# Altium schematic symbol library NTIR_Integrated_IC.SchLib: 17 symbols (part 1 of 2)
Pins are listed as number, name and electrical type; pins without a type are passive.

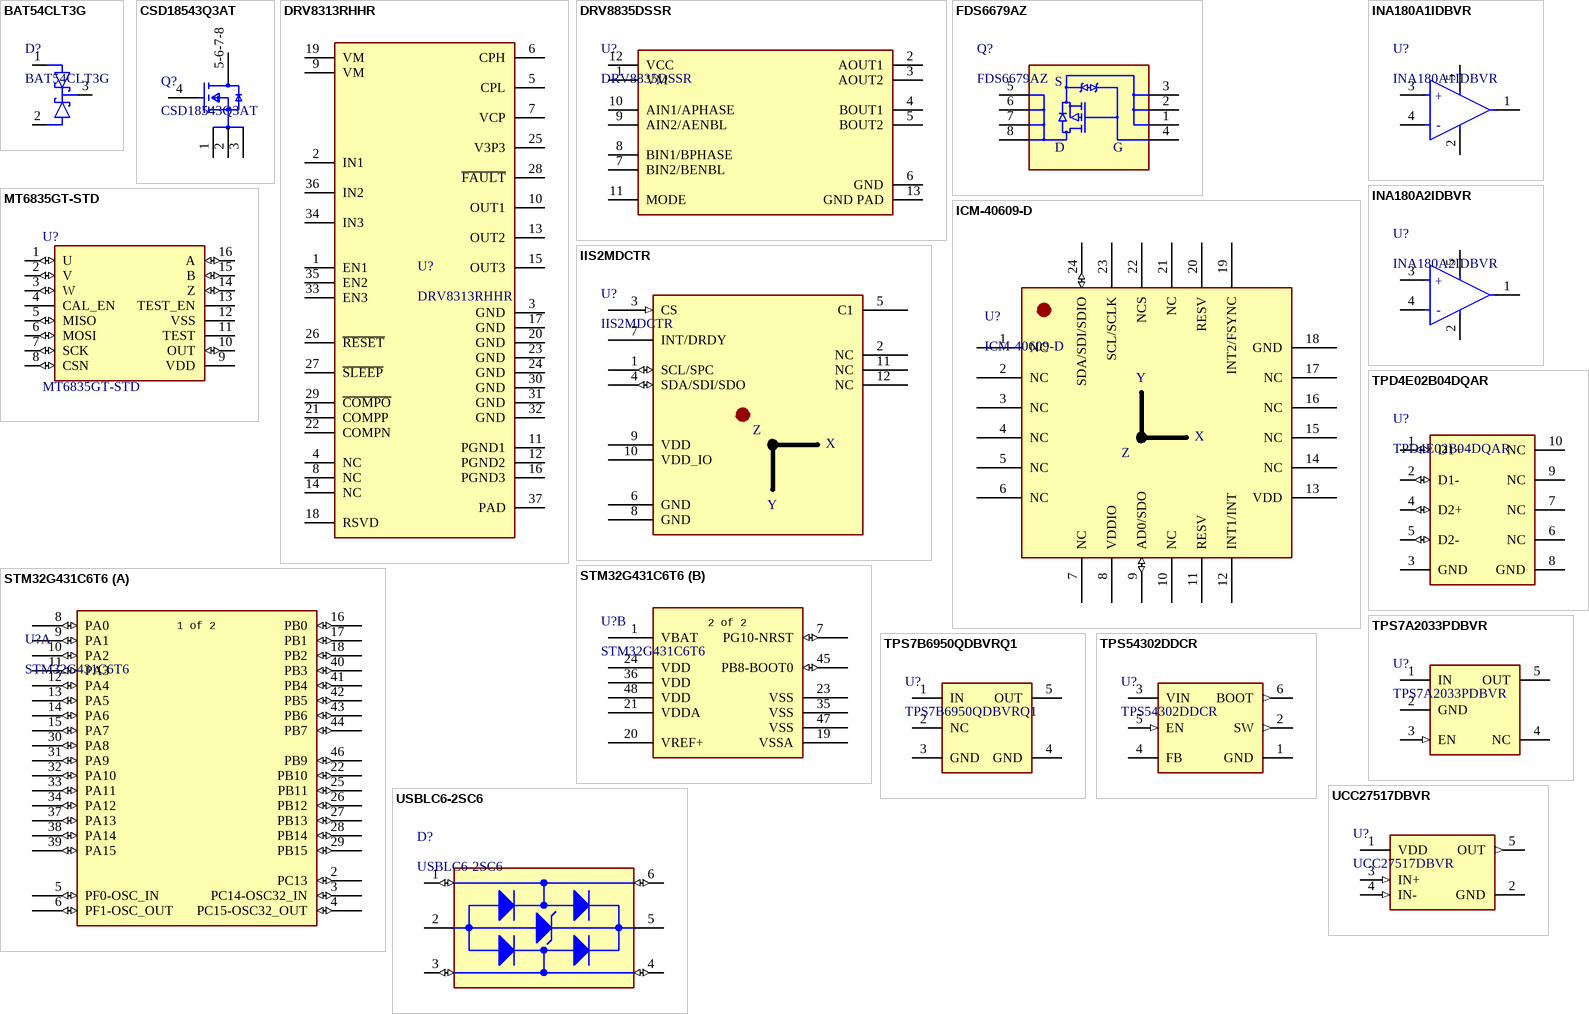
[diagram p0: symbols BAT54CLT3G to USBLC6-2SC6]

## BAT54CLT3G
designator D?
BAT54CL Series 30 V 2 uA Surface Mount Schottky Barrier Diode - SOT-23; Manufacturer: onsemi; Manufacturer Lifecycle Status: ACTIVE; Average Rectified Current: 200mA; Element Configuration: Common Cathode; Forward Voltage: 240mV; Max Forward Surge Current (Ifsm): 600mA; Max Output Current: 100mA; Max Power Dissipation: 225mW; Max Repetitive Reverse Voltage (Vrrm): 30V; Max Reverse Leakage Current: 2µA; Number of Elements: 2; Recovery Time: 5ns; Supplier 1: DigiKey; Manufacturer Part Number: BAT54CLT3G; RoHS: Compliant; Category: Schottky Diodes; Stock 1: 167313; Pricing 1: 1=0.13, 10=0.081, 100=0.0499, 500=0.036, 1000=0.03147, 2000=0.02764, 5000=0.02347 (USD); Case/Package: SOT-23-3; China RoHS: Compliant; Contact Plating: Tin; Forward Current: 200mA; Halogen Free: Halogen Free; Height: 1.01mm; Lead Free: Lead Free; Length: 3.04mm; Lifecycle Status: Production; Max Operating Temperature: 125°C; Max Reverse Voltage (DC): 30V; Max Surge Current: 600mA; Min Operating Temperature: -55°C; Number of Pins: 3; Number of Terminals: 3; Packaging: Tape and Reel; Peak Non-Repetitive Surge Current: 600mA; Radiation Hardening: No; REACH SVHC: Yes; Reverse Recovery Time: 5ns; Schedule B: 8541100070, 8541100070|8541100070|8541100070|8541100070|8541100070; Width: 1.4mm; ComponentLink1URL: https://datasheet.octopart.com:443/BAT54CLT3G-onsemi-datasheet-175423440.pdf?src-supplier=IHS; ComponentLink1Description: https://datasheet.octopart.com:443/BAT54CLT3G-onsemi-datasheet-175423440.pdf?src-supplier=IHS; ComponentLink2URL: https://datasheet.octopart.com:443/BAT54CLT3G-ON-Semiconductor-datasheet-78758876.pdf?src-supplier=JRH+Electronics; ComponentLink2Description: https://datasheet.octopart.com:443/BAT54CLT3G-ON-Semiconductor-datasheet-78758876.pdf?src-supplier=JRH+Electronics; ComponentLink3URL: https://datasheet.octopart.com:443/BAT54CLT3G-ON-Semiconductor-datasheet-141916634.pdf?src-supplier=Upverter; ComponentLink3Description: https://datasheet.octopart.com:443/BAT54CLT3G-ON-Semiconductor-datasheet-141916634.pdf?src-supplier=Upverter; ComponentLink4URL: https://datasheet.octopart.com:443/BAT54CLT3G-ON-Semiconductor-datasheet-8332005.pdf?src-supplier=Future+Electronics; ComponentLink4Description: https://datasheet.octopart.com:443/BAT54CLT3G-ON-Semiconductor-datasheet-8332005.pdf?src-supplier=Future+Electronics; ComponentLink5URL: https://datasheet.octopart.com:443/BAT54CLT3G-ON-Semiconductor-datasheet-8106935.pdf?src-supplier=Future+Electronics; ComponentLink5Description: https://datasheet.octopart.com:443/BAT54CLT3G-ON-Semiconductor-datasheet-8106935.pdf?src-supplier=Future+Electronics; ComponentLink6URL: https://datasheet.octopart.com:443/BAT54CLT3G-ON-Semiconductor-datasheet-41525499.pdf?src-supplier=RS+(Formerly+Allied+Electronics); ComponentLink6Description: https://datasheet.octopart.com:443/BAT54CLT3G-ON-Semiconductor-datasheet-41525499.pdf?src-supplier=RS+(Formerly+Allied+Electronics); ComponentLink7URL: https://datasheet.octopart.com:443/BAT54CLT3G-onsemi-datasheet-189128037.pdf?src-supplier=Master+Electronics; ComponentLink7Description: https://datasheet.octopart.com:443/BAT54CLT3G-onsemi-datasheet-189128037.pdf?src-supplier=Master+Electronics; ComponentLink8URL: https://datasheet.octopart.com:443/BAT54CLT3G-ON-Semiconductor-datasheet-11629545.pdf?src-supplier=Arrow+Electronics; ComponentLink8Description: https://datasheet.octopart.com:443/BAT54CLT3G-ON-Semiconductor-datasheet-11629545.pdf?src-supplier=Arrow+Electronics; ComponentLink9URL: http://sigma.octopart.com:80/15540786/rohs_certificate/ON-Semiconductor-BAT54CLT3G.pdf?src-supplier=Compliance+Statements; ComponentLink9Description: http://sigma.octopart.com:80/15540786/rohs_certificate/ON-Semiconductor-BAT54CLT3G.pdf?src-supplier=Compliance+Statements; ComponentLink10URL: http://sigma.octopart.com:80/15674214/materials_sheet/ON-Semiconductor-BAT54CLT3G.csv?src-supplier=Compliance+Statements; ComponentLink10Description: http://sigma.octopart.com:80/15674214/materials_sheet/ON-Semiconductor-BAT54CLT3G.csv?src-supplier=Compliance+Statements; ComponentLink11URL: http://sigma.octopart.com:80/150604010/rohs_statement/ON-Semiconductor-BAT54CLT3G.pdf?src-supplier=Compliance+Statements; ComponentLink11Description: http://sigma.octopart.com:80/150604010/rohs_statement/ON-Semiconductor-BAT54CLT3G.pdf?src-supplier=Compliance+Statements; ComponentLink12URL: http://sigma.octopart.com:80/reach_statement/ON-Semiconductor-company-79.pdf?src-supplier=Compliance+Statements; ComponentLink12Description: http://sigma.octopart.com:80/reach_statement/ON-Semiconductor-company-79.pdf?src-supplier=Compliance+Statements; ComponentLink13URL: https://octopart.com:443/opatz8j6/c1?t=fWwoKikT5261mXGM0ypy0g0IGQzQcDddsSZuvbSVdmB-1nZSRZ4ggwUKqIc0QYATxiN1QNv3tc5K9gNLWSsypfRmlmmLl0CvTb6IWTPcR-jy4ZtU7iJlv7LHrjajWQE2jihf16JKVcuOV1nA2-N-excMr1_B4nLS4kXG99ZhUnnRORXzXCD22yMfTlIHVWxdWHuIGrDRLRfDN_FEl5iESrFYiOS-fWRa5LxuqDiveXSQWuYMoy0mSfHtN-TtcfG_yO7Nd7kaCwpBKZqOkFRn_ARKtZBKqK2rNXBFzcF_wkdg0CPJ3JBCCd0-fzEpMgisCGH-zXoAjZ7-YzxmcgmCGNIVYquym6vDa-BdygE&src-supplier=Compliance+Statements; ComponentLink13Description: https://octopart.com:443/opatz8j6/c1?t=fWwoKikT5261mXGM0ypy0g0IGQzQcDddsSZuvbSVdmB-1nZSRZ4ggwUKqIc0QYATxiN1QNv3tc5K9gNLWSsypfRmlmmLl0CvTb6IWTPcR-jy4ZtU7iJlv7LHrjajWQE2jihf16JKVcuOV1nA2-N-excMr1_B4nLS4kXG99ZhUnnRORXzXCD22yMfTlIHVWxdWHuIGrDRLRfDN_FEl5iESrFYiOS-fWRa5LxuqDiveXSQWuYMoy0mSfHtN-TtcfG_yO7Nd7kaCwpBKZqOkFRn_ARKtZBKqK2rNXBFzcF_wkdg0CPJ3JBCCd0-fzEpMgisCGH-zXoAjZ7-YzxmcgmCGNIVYquym6vDa-BdygE&src-supplier=Compliance+Statements; ComponentLink14URL: https://octopart.com:443/opatz8j6/c1?t=B_1W9NDPKiVW9_xeBhSjXW6qpRFQt1GubKuBeL6C7KMWiDqOWuxbkOIcp9dqtX3Yq8--5XW88lfGBVA7HmD66DFyQvDNcrrPjWXZiG4711EOeHHnHpPqwc95_S4fQme7yE9n3sYxdAQvxBXSm4yRVJ71c-OpzKpAJ6ywCVT0a0sKLuIcOVcaIgD61fZtF_LS1kcCDjRxNYrL9WJZcGi5NptJxef-JqYkGUKDfcFHMGi1KZqXCgPZbgxa-Fw5LZxpHp3-6aQwXylQzVvUqX6mobR1Vl3H8PpiMaQjr6OwzEQ9egeKJpLqUcsu08VRy-SY_uHfFQyy3GilZ_cbGYiHirfBU5Mi5EnID-Ym-OKf&src-supplier=Compliance+Statements; ComponentLink14Description: https://octopart.com:443/opatz8j6/c1?t=B_1W9NDPKiVW9_xeBhSjXW6qpRFQt1GubKuBeL6C7KMWiDqOWuxbkOIcp9dqtX3Yq8--5XW88lfGBVA7HmD66DFyQvDNcrrPjWXZiG4711EOeHHnHpPqwc95_S4fQme7yE9n3sYxdAQvxBXSm4yRVJ71c-OpzKpAJ6ywCVT0a0sKLuIcOVcaIgD61fZtF_LS1kcCDjRxNYrL9WJZcGi5NptJxef-JqYkGUKDfcFHMGi1KZqXCgPZbgxa-Fw5LZxpHp3-6aQwXylQzVvUqX6mobR1Vl3H8PpiMaQjr6OwzEQ9egeKJpLqUcsu08VRy-SY_uHfFQyy3GilZ_cbGYiHirfBU5Mi5EnID-Ym-OKf&src-supplier=Compliance+Statements; Supplier Part Number 1: BAT54CLT3GOSDKR-ND
footprint ONSC-SOT-23-3-318-08_V (SOT23, 3-Leads, Body 2.92x1.3mm, Pitch 0.95mm)
pins: 1 A1, 2 A2, 3 K

## CSD18543Q3AT
designator Q?
60-V, N channel NexFET™ power MOSFET, single SON 3 mm x 3 mm, 9.9 mOhm 8-VSONP -55 to 150; Manufacturer: Texas Instruments; Manufacturer Lifecycle Status: ACTIVE; Continuous Drain Current (ID): 12A; Drain to Source Breakdown Voltage: 60V; Drain to Source Resistance: 8.1mΩ; Gate to Source Voltage (Vgs): 20V; Max Junction Temperature (Tj): 150°C; Number of Channels: 1; Power Dissipation: 2.8W; Turn-Off Delay Time: 8ns; Turn-On Delay Time: 9ns; Supplier 1: DigiKey; Manufacturer Part Number: CSD18543Q3AT; RoHS: Compliant; Category: MOSFETs; Stock 1: 4526; Pricing 1: 1=2.29, 10=1.462, 100=0.9912 (USD); Drain to Source Voltage (Vdss): 60V; Element Configuration: Single; Height: 900µm; Length: 3.3mm; Lifecycle Status: Production; Max Operating Temperature: 150°C; Min Operating Temperature: -55°C; Number of Pins: 8; Schedule B: 8541290080, 8541290080|8541290080, 8541290080|8541290080|8541290080|8541290080|8541290080; Thickness: 800µm; Width: 3.3mm; ComponentLink1URL: https://sigma.octopart.com:443/184372195/technical_drawing/Texas-Instruments-CSD18543Q3AT.pdf?src-supplier=Texas+Instruments; ComponentLink1Description: https://sigma.octopart.com:443/184372195/technical_drawing/Texas-Instruments-CSD18543Q3AT.pdf?src-supplier=Texas+Instruments; ComponentLink2URL: https://octopart.com:443/opatz8j6/c1?t=SsZgKvRmmw05RbnxMb6edfQyltnbhyNkxL9f19K7YcDX2j1foEMjoZPIc1l6vPtWCior1K7MK4Ecl1cKgo7MV1fVyam4EaqiB1Wt0OcocW5rsSx2yHOKWqXc7qV_A0CR85SjtUmhgxtnEX_hM021VMdHmrWiCD7BUQ-eFjN1wT7d3uOjDZQ6HjTgQKaKXek5tndBDP7-u4o-8p4DuqFUS4zP_5tfnTJWQnkrrbk4pzubypwZn_kVBqW1ULvAfegc6D8FFE5u7LfzGe8qoWlBn9GcTR49XIZj8i8BnCmCBkJ1P3eljVqSMcggCW9mefLwr27y7eoW1Wo15o2SxNy6lW0bRjf9UomrOlGTID-rE5uK6cy_FeSS_Sykc-I3kUdFVxsB4BxBI3g&src-supplier=Texas+Instruments; ComponentLink2Description: https://octopart.com:443/opatz8j6/c1?t=SsZgKvRmmw05RbnxMb6edfQyltnbhyNkxL9f19K7YcDX2j1foEMjoZPIc1l6vPtWCior1K7MK4Ecl1cKgo7MV1fVyam4EaqiB1Wt0OcocW5rsSx2yHOKWqXc7qV_A0CR85SjtUmhgxtnEX_hM021VMdHmrWiCD7BUQ-eFjN1wT7d3uOjDZQ6HjTgQKaKXek5tndBDP7-u4o-8p4DuqFUS4zP_5tfnTJWQnkrrbk4pzubypwZn_kVBqW1ULvAfegc6D8FFE5u7LfzGe8qoWlBn9GcTR49XIZj8i8BnCmCBkJ1P3eljVqSMcggCW9mefLwr27y7eoW1Wo15o2SxNy6lW0bRjf9UomrOlGTID-rE5uK6cy_FeSS_Sykc-I3kUdFVxsB4BxBI3g&src-supplier=Texas+Instruments; ComponentLink3URL: https://sigma.octopart.com:443/181443430/technical_drawing/Texas-Instruments-CSD18543Q3AT.pdf?src-supplier=Texas+Instruments; ComponentLink3Description: https://sigma.octopart.com:443/181443430/technical_drawing/Texas-Instruments-CSD18543Q3AT.pdf?src-supplier=Texas+Instruments; ComponentLink4URL: https://datasheet.octopart.com:443/CSD18543Q3AT-Texas-Instruments-datasheet-73765672.pdf?src-supplier=Upverter; ComponentLink4Description: https://datasheet.octopart.com:443/CSD18543Q3AT-Texas-Instruments-datasheet-73765672.pdf?src-supplier=Upverter; ComponentLink5URL: https://datasheet.octopart.com:443/CSD18543Q3AT-Texas-Instruments-datasheet-160724818.pdf?src-supplier=Augswan; ComponentLink5Description: https://datasheet.octopart.com:443/CSD18543Q3AT-Texas-Instruments-datasheet-160724818.pdf?src-supplier=Augswan; ComponentLink6URL: http://sigma.octopart.com:80/reach_statement/Texas-Instruments-company-64.pdf?src-supplier=Compliance+Statements; ComponentLink6Description: http://sigma.octopart.com:80/reach_statement/Texas-Instruments-company-64.pdf?src-supplier=Compliance+Statements; ComponentLink7URL: http://sigma.octopart.com:80/conflict_mineral_statement/Texas-Instruments-company-63.pdf?src-supplier=Compliance+Statements; ComponentLink7Description: http://sigma.octopart.com:80/conflict_mineral_statement/Texas-Instruments-company-63.pdf?src-supplier=Compliance+Statements; Supplier Part Number 1: 296-45302-1-ND
footprint FP-DNH0008A-MFG
pins: 1 S, 2 S, 3 S, 4 G, 5-6-7-8 D

## DRV8313RHHR
designator U?
65-V max 3-A peak 3-phase motor driver with integrated FETs 36-VQFN -40 to 125; Manufacturer_Name: Texas Instruments; TYPE: TYPE; RefDes: RefDes; Copyright: Copyright (C) 2026 Ultra Librarian. All rights reserved.; Manufacturer_Part_Number: DRV8313RHHR
footprint QFN50P600X600X90-37N
pins: 1 EN1, 2 IN1, 3 GND, 4 NC, 5 CPL, 6 CPH, 7 VCP, 8 NC, 9 VM, 10 OUT1, 11 PGND1, 12 PGND2, 13 OUT2, 14 NC, 15 OUT3, 16 PGND3, 17 GND, 18 RSVD, 19 VM, 20 GND, 21 COMPP, 22 COMPN, 23 GND, 24 GND, 25 V3P3, 26 ~{RESET}, 27 ~{SLEEP}, 28 ~{FAULT}, 29 ~{COMPO}, 30 GND, 31 GND, 32 GND, 33 EN3, 34 IN3, 35 EN2, 36 IN2, 37 PAD

## DRV8835DSSR
designator U?
12-V, 1.5-A dual H-bridge motor driver 12-WSON -40 to 85; Manufacturer: Texas Instruments; Manufacturer Lifecycle Status: ACTIVE; Collector Emitter Voltage (VCEO): 11V; Drain to Source Resistance: 305mΩ; Interface: Parallel; Logic Function: AND; Max Collector Current: 1.5A; Max Junction Temperature (Tj): 150°C; Max Supply Voltage: 7V; Min Supply Voltage: 2V; Motor Type: Brushed; Nominal Supply Current: 450µA; Number of Outputs: 2; Switching Frequency: 250kHz; Supplier 1: DigiKey; Manufacturer Part Number: DRV8835DSSR; RoHS: Compliant; Category: Motor Drivers; Stock 1: 49571; Pricing 1: 1=2.19, 10=1.619, 25=1.476, 100=1.3189, 250=1.24396, 500=1.20412 (USD); Height: 800µm; Lead Free: Lead Free; Length: 2mm; Lifecycle Status: Production; Max Operating Temperature: 85°C; Min Operating Temperature: -40°C; Mount: Surface Mount; Number of Pins: 12; Operating Supply Current: 1.5A; Output Current: 1.5A; Output Voltage: 11V; Packaging: Cut Tape; Radiation Hardening: No; REACH SVHC: No; Schedule B: 8542390000, 8542390000|8542390000|8542390000|8542390000|8542390000; Thickness: 750µm; Width: 3mm; ComponentLink1URL: https://sigma.octopart.com:443/81678663/technical_drawing/Texas-Instruments-DRV8835DSSR.pdf?src-supplier=Texas+Instruments; ComponentLink1Description: https://sigma.octopart.com:443/81678663/technical_drawing/Texas-Instruments-DRV8835DSSR.pdf?src-supplier=Texas+Instruments; ComponentLink2URL: https://octopart.com:443/opatz8j6/c1?t=yYKeYF_qTZgJqykfbkIe-MyNo-awpiDwQJ1JpZHc4QQmRE2ALxlPI2F5HuxbvxDQJgOwt9AujW2Z3abA8YObzfh8IObdK5EIxXvX-S8nfL3vF03rQCSr4IhvPx36lTDUzRho3FSTerecEi6PUwZQAcfw4biX9dfhX4qJFG4-DvkdYyzF_AXHfcrjW8NYqjtFm1Ig3y5pJIb4XtmcjhG94Ou3GqVr8sF3hx5Ni2mUq8MJhRMvjbwS2P2fKQOZ0GhDVzPGf3Gk655UHMKd4eaVKvQsspbWj7NAZfnUy6KTI0iGS1VjwsOnAAAnyZzeHo6qjg_9VUaOVsM5A2TuwDIAEEDLISKE6EaKfj0-xcuZ4_eWrZcxUU_9i-up4dsoawxXY1pm7Q&src-supplier=Texas+Instruments; ComponentLink2Description: https://octopart.com:443/opatz8j6/c1?t=yYKeYF_qTZgJqykfbkIe-MyNo-awpiDwQJ1JpZHc4QQmRE2ALxlPI2F5HuxbvxDQJgOwt9AujW2Z3abA8YObzfh8IObdK5EIxXvX-S8nfL3vF03rQCSr4IhvPx36lTDUzRho3FSTerecEi6PUwZQAcfw4biX9dfhX4qJFG4-DvkdYyzF_AXHfcrjW8NYqjtFm1Ig3y5pJIb4XtmcjhG94Ou3GqVr8sF3hx5Ni2mUq8MJhRMvjbwS2P2fKQOZ0GhDVzPGf3Gk655UHMKd4eaVKvQsspbWj7NAZfnUy6KTI0iGS1VjwsOnAAAnyZzeHo6qjg_9VUaOVsM5A2TuwDIAEEDLISKE6EaKfj0-xcuZ4_eWrZcxUU_9i-up4dsoawxXY1pm7Q&src-supplier=Texas+Instruments; ComponentLink3URL: https://datasheet.octopart.com:443/DRV8835DSSR-Texas-Instruments-datasheet-15896035.pdf?src-supplier=Texas+Instruments; ComponentLink3Description: https://datasheet.octopart.com:443/DRV8835DSSR-Texas-Instruments-datasheet-15896035.pdf?src-supplier=Texas+Instruments; ComponentLink4URL: https://datasheet.octopart.com:443/DRV8835DSSR-Texas-Instruments-datasheet-10948952.pdf?src-supplier=Texas+Instruments; ComponentLink4Description: https://datasheet.octopart.com:443/DRV8835DSSR-Texas-Instruments-datasheet-10948952.pdf?src-supplier=Texas+Instruments; ComponentLink5URL: https://sigma.octopart.com:443/49250719/technical_drawing/Texas-Instruments-DRV8835DSSR.pdf?src-supplier=Texas+Instruments; ComponentLink5Description: https://sigma.octopart.com:443/49250719/technical_drawing/Texas-Instruments-DRV8835DSSR.pdf?src-supplier=Texas+Instruments; ComponentLink6URL: https://datasheet.octopart.com:443/DRV8835DSSR-Texas-Instruments-datasheet-21773231.pdf?src-supplier=element14+APAC; ComponentLink6Description: https://datasheet.octopart.com:443/DRV8835DSSR-Texas-Instruments-datasheet-21773231.pdf?src-supplier=element14+APAC; ComponentLink7URL: https://datasheet.octopart.com:443/DRV8835DSSR-Texas-Instruments-datasheet-17762361.pdf?src-supplier=element14+APAC; ComponentLink7Description: https://datasheet.octopart.com:443/DRV8835DSSR-Texas-Instruments-datasheet-17762361.pdf?src-supplier=element14+APAC; ComponentLink8URL: https://datasheet.octopart.com:443/DRV8835DSSR-Texas-Instruments-datasheet-11523579.pdf?src-supplier=Upverter; ComponentLink8Description: https://datasheet.octopart.com:443/DRV8835DSSR-Texas-Instruments-datasheet-11523579.pdf?src-supplier=Upverter; ComponentLink9URL: https://datasheet.octopart.com:443/DRV8835DSSR-Texas-Instruments-datasheet-102488860.pdf?src-supplier=Farnell; ComponentLink9Description: https://datasheet.octopart.com:443/DRV8835DSSR-Texas-Instruments-datasheet-102488860.pdf?src-supplier=Farnell; ComponentLink10URL: https://datasheet.octopart.com:443/DRV8835DSSR-Texas-Instruments-datasheet-165803887.pdf?src-supplier=LCSC; ComponentLink10Description: https://datasheet.octopart.com:443/DRV8835DSSR-Texas-Instruments-datasheet-165803887.pdf?src-supplier=LCSC; ComponentLink11URL: https://datasheet.octopart.com:443/DRV8835DSSR-Texas-Instruments-datasheet-159606066.pdf?src-supplier=LCSC; ComponentLink11Description: https://datasheet.octopart.com:443/DRV8835DSSR-Texas-Instruments-datasheet-159606066.pdf?src-supplier=LCSC; ComponentLink12URL: https://datasheet.octopart.com:443/DRV8835DSSR-Texas-Instruments-datasheet-164414299.pdf?src-supplier=SHENGYU+ELECTRONICS; ComponentLink12Description: https://datasheet.octopart.com:443/DRV8835DSSR-Texas-Instruments-datasheet-164414299.pdf?src-supplier=SHENGYU+ELECTRONICS; ComponentLink13URL: https://datasheet.octopart.com:443/DRV8835DSSR-Texas-Instruments-datasheet-62346020.pdf?src-supplier=Newark; ComponentLink13Description: https://datasheet.octopart.com:443/DRV8835DSSR-Texas-Instruments-datasheet-62346020.pdf?src-supplier=Newark; ComponentLink14URL: https://datasheet.octopart.com:443/DRV8835DSSR-Texas-Instruments-datasheet-179109355.pdf?src-supplier=Arrow.cn; ComponentLink14Description: https://datasheet.octopart.com:443/DRV8835DSSR-Texas-Instruments-datasheet-179109355.pdf?src-supplier=Arrow.cn; ComponentLink15URL: http://sigma.octopart.com:80/reach_statement/Texas-Instruments-company-64.pdf?src-supplier=Compliance+Statements; ComponentLink15Description: http://sigma.octopart.com:80/reach_statement/Texas-Instruments-company-64.pdf?src-supplier=Compliance+Statements; ComponentLink16URL: http://sigma.octopart.com:80/conflict_mineral_statement/Texas-Instruments-company-63.pdf?src-supplier=Compliance+Statements; ComponentLink16Description: http://sigma.octopart.com:80/conflict_mineral_statement/Texas-Instruments-company-63.pdf?src-supplier=Compliance+Statements; Supplier Part Number 1: 296-30391-1-ND
footprint FP-DSS0012A-MFG
pins: 1 VM (power), 2 AOUT1, 3 AOUT2, 4 BOUT1, 5 BOUT2, 6 GND (power), 7 BIN2/BENBL, 8 BIN1/BPHASE, 9 AIN2/AENBL, 10 AIN1/APHASE, 11 MODE, 12 VCC (power), 13 GND PAD (power)

## FDS6679AZ
designator Q?
P-Channel 30 V 9.3 mOhm Surface Mount PowerTrench Mosfet - SOIC-8; Manufacturer: onsemi; Manufacturer Lifecycle Status: ACTIVE; Continuous Drain Current (ID): 13A; Current Rating: -13A; Drain to Source Breakdown Voltage: -30V; Drain to Source Resistance: 9.3mΩ; Element Configuration: Single; Fall Time: 92ns; Gate to Source Voltage (Vgs): 25V; Input Capacitance: 3.845nF; Max Junction Temperature (Tj): 150°C; Max Power Dissipation: 2.5W; Min Breakdown Voltage: 30V; Nominal Vgs: -1.9V; Number of Channels: 1; Power Dissipation: 1W; Rise Time: 15ns; Turn-Off Delay Time: 210ns; Turn-On Delay Time: 13ns; Supplier 1: DigiKey; Manufacturer Part Number: FDS6679AZ; RoHS: Compliant; Category: MOSFETs; Stock 1: 5617; Pricing 1: 1=1.6, 10=1.014, 100=0.6743, 500=0.5287, 1000=0.48185 (USD); Case/Package: SOIC; China RoHS: Compliant; Contact Plating: Tin; Country of Origin: Philippines; Drain to Source Voltage (Vdss): -30V; Export Control Classification Number (ECCN) Code: EAR99; Height: 1.75mm; Harmonized Tariff Schedule (HTS) Code: 8541.29.00.95; Introduction Date: 2006-02-10; Lead Free: Lead Free; Length: 5mm; Lifecycle Status: Production; Max Operating Temperature: 150°C; Min Operating Temperature: -55°C; Mount: Surface Mount; Number of Elements: 1; Number of Pins: 8; Number of Terminals: 8; Packaging: Tape & Reel; Radiation Hardening: No; Rds On Max: 9.3mΩ; REACH SVHC: Yes; Resistance: 9.3MΩ; Schedule B: 8541290080, 8541290080|8541290080|8541290080|8541290080|8541290080; Threshold Voltage: -1.9V; Voltage Rating (DC): -30V; Weight: 130mg; Width: 4mm; ComponentLink1URL: https://datasheet.octopart.com:443/FDS6679AZ-ON-Semiconductor-datasheet-5375043.pdf?src-supplier=element14+APAC; ComponentLink1Description: https://datasheet.octopart.com:443/FDS6679AZ-ON-Semiconductor-datasheet-5375043.pdf?src-supplier=element14+APAC; ComponentLink2URL: https://datasheet.octopart.com:443/FDS6679AZ-ON-Semiconductor-datasheet-80928664.pdf?src-supplier=element14+APAC; ComponentLink2Description: https://datasheet.octopart.com:443/FDS6679AZ-ON-Semiconductor-datasheet-80928664.pdf?src-supplier=element14+APAC; ComponentLink3URL: https://datasheet.octopart.com:443/FDS6679AZ-Fairchild-Semiconductor-datasheet-76739748.pdf?src-supplier=element14+APAC; ComponentLink3Description: https://datasheet.octopart.com:443/FDS6679AZ-Fairchild-Semiconductor-datasheet-76739748.pdf?src-supplier=element14+APAC; ComponentLink4URL: https://datasheet.octopart.com:443/FDS6679AZ.-Fairchild-Semiconductor-datasheet-68450872.pdf?src-supplier=element14+APAC; ComponentLink4Description: https://datasheet.octopart.com:443/FDS6679AZ.-Fairchild-Semiconductor-datasheet-68450872.pdf?src-supplier=element14+APAC; ComponentLink5URL: https://datasheet.octopart.com:443/FDS6679AZ.-Fairchild-Semiconductor-datasheet-76739753.pdf?src-supplier=element14+APAC; ComponentLink5Description: https://datasheet.octopart.com:443/FDS6679AZ.-Fairchild-Semiconductor-datasheet-76739753.pdf?src-supplier=element14+APAC; ComponentLink6URL: https://datasheet.octopart.com:443/FDS6679AZ-onsemi-datasheet-164563882.pdf?src-supplier=IHS; ComponentLink6Description: https://datasheet.octopart.com:443/FDS6679AZ-onsemi-datasheet-164563882.pdf?src-supplier=IHS; ComponentLink7URL: https://sigma.octopart.com:443/138897548/technical_drawing/onsemi-FDS6679AZ.pdf?src-supplier=Upverter; ComponentLink7Description: https://sigma.octopart.com:443/138897548/technical_drawing/onsemi-FDS6679AZ.pdf?src-supplier=Upverter; ComponentLink8URL: https://datasheet.octopart.com:443/FDS6679AZ-ON-Semiconductor-datasheet-97399181.pdf?src-supplier=Future+Electronics; ComponentLink8Description: https://datasheet.octopart.com:443/FDS6679AZ-ON-Semiconductor-datasheet-97399181.pdf?src-supplier=Future+Electronics; ComponentLink9URL: https://datasheet.octopart.com:443/FDS6679AZ-ON-Semiconductor-datasheet-86694006.pdf?src-supplier=onsemi; ComponentLink9Description: https://datasheet.octopart.com:443/FDS6679AZ-ON-Semiconductor-datasheet-86694006.pdf?src-supplier=onsemi; ComponentLink10URL: https://datasheet.octopart.com:443/FDS6679AZ-ON-Semiconductor-datasheet-86689283.pdf?src-supplier=Farnell; ComponentLink10Description: https://datasheet.octopart.com:443/FDS6679AZ-ON-Semiconductor-datasheet-86689283.pdf?src-supplier=Farnell; ComponentLink11URL: https://datasheet.octopart.com:443/FDS6679AZ-Fairchild-Semiconductor-datasheet-67356198.pdf?src-supplier=Farnell; ComponentLink11Description: https://datasheet.octopart.com:443/FDS6679AZ-Fairchild-Semiconductor-datasheet-67356198.pdf?src-supplier=Farnell; ComponentLink12URL: https://datasheet.octopart.com:443/FDS6679AZ.-Fairchild-Semiconductor-datasheet-81472158.pdf?src-supplier=Farnell; ComponentLink12Description: https://datasheet.octopart.com:443/FDS6679AZ.-Fairchild-Semiconductor-datasheet-81472158.pdf?src-supplier=Farnell; ComponentLink13URL: https://datasheet.octopart.com:443/FDS6679AZ-Fairchild-Semiconductor-datasheet-68333325.pdf?src-supplier=Newark; ComponentLink13Description: https://datasheet.octopart.com:443/FDS6679AZ-Fairchild-Semiconductor-datasheet-68333325.pdf?src-supplier=Newark; ComponentLink14URL: https://datasheet.octopart.com:443/FDS6679AZ-Fairchild-datasheet-134401.pdf?src-supplier=Mouser; ComponentLink14Description: https://datasheet.octopart.com:443/FDS6679AZ-Fairchild-datasheet-134401.pdf?src-supplier=Mouser; ComponentLink15URL: https://sigma.octopart.com:443/33068652/technical_drawing/Fairchild-Semiconductor-FDS6679AZ.pdf?src-supplier=Fairchild+Semiconductor; ComponentLink15Description: https://sigma.octopart.com:443/33068652/technical_drawing/Fairchild-Semiconductor-FDS6679AZ.pdf?src-supplier=Fairchild+Semiconductor; ComponentLink16URL: https://sigma.octopart.com:443/17345426/technical_drawing/Fairchild-Semiconductor-FDS6679AZ.pdf?src-supplier=Fairchild+Semiconductor; ComponentLink16Description: https://sigma.octopart.com:443/17345426/technical_drawing/Fairchild-Semiconductor-FDS6679AZ.pdf?src-supplier=Fairchild+Semiconductor; ComponentLink17URL: https://datasheet.octopart.com:443/FDS6679AZ-Fairchild-Semiconductor-datasheet-14042453.pdf?src-supplier=iiiC; ComponentLink17Description: https://datasheet.octopart.com:443/FDS6679AZ-Fairchild-Semiconductor-datasheet-14042453.pdf?src-supplier=iiiC; ComponentLink18URL: https://datasheet.octopart.com:443/FDS6679AZ-Fairchild-datasheet-7560025.pdf?src-supplier=Jameco+(USA); ComponentLink18Description: https://datasheet.octopart.com:443/FDS6679AZ-Fairchild-datasheet-7560025.pdf?src-supplier=Jameco+(USA); ComponentLink19URL: https://datasheet.octopart.com:443/FDS6679AZ-ON-Semiconductor-datasheet-81454864.pdf?src-supplier=TME; ComponentLink19Description: https://datasheet.octopart.com:443/FDS6679AZ-ON-Semiconductor-datasheet-81454864.pdf?src-supplier=TME; ComponentLink20URL: http://sigma.octopart.com:80/150609504/rohs_statement/ON-Semiconductor-FDS6679AZ.pdf?src-supplier=Compliance+Statements; ComponentLink20Description: http://sigma.octopart.com:80/150609504/rohs_statement/ON-Semiconductor-FDS6679AZ.pdf?src-supplier=Compliance+Statements; ComponentLink21URL: http://sigma.octopart.com:80/17348684/reach_statement/Fairchild-Semiconductor-FDS6679AZ.pdf?src-supplier=Compliance+Statements; ComponentLink21Description: http://sigma.octopart.com:80/17348684/reach_statement/Fairchild-Semiconductor-FDS6679AZ.pdf?src-supplier=Compliance+Statements; ComponentLink22URL: http://sigma.octopart.com:80/17348685/materials_sheet/Fairchild-Semiconductor-FDS6679AZ.pdf?src-supplier=Compliance+Statements; ComponentLink22Description: http://sigma.octopart.com:80/17348685/materials_sheet/Fairchild-Semiconductor-FDS6679AZ.pdf?src-supplier=Compliance+Statements; ComponentLink23URL: http://sigma.octopart.com:80/33158879/reach_statement/Fairchild-Semiconductor-FDS6679AZ.pdf?src-supplier=Compliance+Statements; ComponentLink23Description: http://sigma.octopart.com:80/33158879/reach_statement/Fairchild-Semiconductor-FDS6679AZ.pdf?src-supplier=Compliance+Statements; ComponentLink24URL: http://sigma.octopart.com:80/33158880/materials_sheet/Fairchild-Semiconductor-FDS6679AZ.pdf?src-supplier=Compliance+Statements; ComponentLink24Description: http://sigma.octopart.com:80/33158880/materials_sheet/Fairchild-Semiconductor-FDS6679AZ.pdf?src-supplier=Compliance+Statements; ComponentLink25URL: http://sigma.octopart.com:80/reach_statement/ON-Semiconductor-company-79.pdf?src-supplier=Compliance+Statements; ComponentLink25Description: http://sigma.octopart.com:80/reach_statement/ON-Semiconductor-company-79.pdf?src-supplier=Compliance+Statements; ComponentLink26URL: http://sigma.octopart.com:80/rohs_statement/Fairchild-Semiconductor-company-11.pdf?src-supplier=Compliance+Statements; ComponentLink26Description: http://sigma.octopart.com:80/rohs_statement/Fairchild-Semiconductor-company-11.pdf?src-supplier=Compliance+Statements; ComponentLink27URL: http://sigma.octopart.com:80/rohs_statement/Fairchild-Semiconductor-company-10.pdf?src-supplier=Compliance+Statements; ComponentLink27Description: http://sigma.octopart.com:80/rohs_statement/Fairchild-Semiconductor-company-10.pdf?src-supplier=Compliance+Statements; ComponentLink28URL: http://sigma.octopart.com:80/reach_statement/Fairchild-Semiconductor-company-9.pdf?src-supplier=Compliance+Statements; ComponentLink28Description: http://sigma.octopart.com:80/reach_statement/Fairchild-Semiconductor-company-9.pdf?src-supplier=Compliance+Statements; ComponentLink29URL: https://octopart.com:443/opatz8j6/c1?t=4Oyv1LeYDwsIO8L8qxQnp0Po6zMXl8PVunE5UiW0_1Bf78CsT5cMW5W_So7H97X-5uZqy10zpPfasuUzqws5XcA_VLbS_Vmy49KZ9zHEf3iAc4ZVb1M_py9SYM3VXHeAlV9HyxbpUjeAPKzpdYUkIAiGNTIKx_vY4ccOv8BgSbfTJvDzkdH7ATfYqb_sp8ru4jOmUW4dugF50iKlz9arCwnIFEqhjjMjX_ed4t013HY1KSFvUQs2GqNvLntOFqVyAt7EXZGWR18BgLCKypZUFf3O_xG4PCkF-dQo7bkL8qumxNpXvF6Z7zCsxEJ2JooRVMS_eTz7IFZK3s_4GmjsTwl5e85-ts-eKpT1lQ&src-supplier=Compliance+Statements; ComponentLink29Description: https://octopart.com:443/opatz8j6/c1?t=4Oyv1LeYDwsIO8L8qxQnp0Po6zMXl8PVunE5UiW0_1Bf78CsT5cMW5W_So7H97X-5uZqy10zpPfasuUzqws5XcA_VLbS_Vmy49KZ9zHEf3iAc4ZVb1M_py9SYM3VXHeAlV9HyxbpUjeAPKzpdYUkIAiGNTIKx_vY4ccOv8BgSbfTJvDzkdH7ATfYqb_sp8ru4jOmUW4dugF50iKlz9arCwnIFEqhjjMjX_ed4t013HY1KSFvUQs2GqNvLntOFqVyAt7EXZGWR18BgLCKypZUFf3O_xG4PCkF-dQo7bkL8qumxNpXvF6Z7zCsxEJ2JooRVMS_eTz7IFZK3s_4GmjsTwl5e85-ts-eKpT1lQ&src-supplier=Compliance+Statements; ComponentLink30URL: https://octopart.com:443/opatz8j6/c1?t=ro154g7lIH210tO7A-0mZYocg1Pbp4WsDD3XZDbut1bw2jBa9w6_1LdNP9-Qq6aexq707JuPiwPhsmxgoYagU0tPwqO5I0AKiZiVNdlAg6nAYnNdV4VaMLOu9w-f4PziN1DKoxGZRy8qRpFrVrvqhRs-IKM6OllR7zJ6hZihJTEtiI-5FOMyJt84xMxmfP08vPavb950UTp4nIlg1AW8hk9TwH2TiLBdHh1UOVacYv-0h4uUxi15b1Hu0TXqCekUOwWxBGHv-L2QL5KbfwI6Jd65b913C0EJMXn4STbGZm_HsSjtXg6q9l6TimFEk84htLlMH5oebCTFyNEoxkQ0FMkMRQTO58nPJavdja4&src-supplier=Compliance+Statements; ComponentLink30Description: https://octopart.com:443/opatz8j6/c1?t=ro154g7lIH210tO7A-0mZYocg1Pbp4WsDD3XZDbut1bw2jBa9w6_1LdNP9-Qq6aexq707JuPiwPhsmxgoYagU0tPwqO5I0AKiZiVNdlAg6nAYnNdV4VaMLOu9w-f4PziN1DKoxGZRy8qRpFrVrvqhRs-IKM6OllR7zJ6hZihJTEtiI-5FOMyJt84xMxmfP08vPavb950UTp4nIlg1AW8hk9TwH2TiLBdHh1UOVacYv-0h4uUxi15b1Hu0TXqCekUOwWxBGHv-L2QL5KbfwI6Jd65b913C0EJMXn4STbGZm_HsSjtXg6q9l6TimFEk84htLlMH5oebCTFyNEoxkQ0FMkMRQTO58nPJavdja4&src-supplier=Compliance+Statements; Supplier Part Number 1: FDS6679AZCT-ND
footprint SOIC8_751EB_ONS
pins: 1, 2, 3, 4 G, 5, 6, 7, 8
text: S; D

## ICM-40609-D
designator U?
IMU (Inertial Measurement Unit), 6-Axis, Accelerometer, Gyroscope; Manufacturer: TDK; Manufacturer Lifecycle Status: PRODUCTION; Supplier 1: DigiKey; Manufacturer Part Number: ICM-40609-D; RoHS: Compliant; Category: Sensors; Stock 1: 4348; Pricing 1: 5000=3.0875 (USD); Introduction Date: 2023-02-15; Length: 3mm; Lifecycle Status: Production; REACH SVHC: Yes; Width: 3mm; ComponentLink1URL: https://datasheet.octopart.com:443/ICM-40609-D-TDK-datasheet-168053012.pdf?src-supplier=TDK; ComponentLink1Description: https://datasheet.octopart.com:443/ICM-40609-D-TDK-datasheet-168053012.pdf?src-supplier=TDK; ComponentLink2URL: https://datasheet.octopart.com:443/ICM-40609-D-TDK-datasheet-178640640.pdf?src-supplier=Farnell; ComponentLink2Description: https://datasheet.octopart.com:443/ICM-40609-D-TDK-datasheet-178640640.pdf?src-supplier=Farnell; Supplier Part Number 1: 1428-ICM-40609-DTR-ND
footprint XDCR_ICM-40609-D
pins: 1 NC, 2 NC, 3 NC, 4 NC, 5 NC, 6 NC, 7 NC, 8 VDDIO (power), 9 AD0/SDO (io), 10 NC, 11 RESV, 12 INT1/INT, 13 VDD (power), 14 NC, 15 NC, 16 NC, 17 NC, 18 GND (power), 19 INT2/FSYNC, 20 RESV, 21 NC, 22 NCS, 23 SCL/SCLK, 24 SDA/SDI/SDIO (io)
text: Y; X; Z

## IIS2MDCTR
designator U?
IIS2MDC Series 3.6 V Ultra-Low-Power 3-axis Digital Magnetic Sensor - LGA-12; Manufacturer: STMicroelectronics; Manufacturer Package Identifier: LGA-12-DM00170568; Axis: X, Y, Z; Max Supply Voltage: 3.6V; Min Supply Voltage: 1.71V; Number of Circuits: 1; Operating Supply Voltage: 2.5V; Sensing Method: Magnetoresistive; Supplier 1: DigiKey; Manufacturer Part Number: IIS2MDCTR; RoHS: Compliant; Category: Hall Effect Sensors; Stock 1: 4818; Pricing 1: 1=3.25, 5=2.9, 10=2.77, 25=2.6136, 50=2.507, 100=2.4091, 500=2.21248, 1000=2.13927, 5000=1.99179 (USD); China RoHS: Compliant; Height: 700µm; Height - Seated (Max): 700µm; Length: 2mm; Lifecycle Status: Production; Max Operating Temperature: 85°C; Min Operating Temperature: -40°C; Number of Terminals: 12; Output Type: Digital; Packaging: Cut Tape; REACH SVHC: Yes; Schedule B: 8542390000, 8542390000|8542390000|8542390000|8542390000|8542390000; Temperature Grade: Industrial; Terminal Pitch: 500µm; Width: 2mm; ComponentLink1URL: https://datasheet.octopart.com:443/IIS2MDCTR-STMicroelectronics-datasheet-101965392.pdf?src-supplier=element14+APAC; ComponentLink1Description: https://datasheet.octopart.com:443/IIS2MDCTR-STMicroelectronics-datasheet-101965392.pdf?src-supplier=element14+APAC
footprint FP-LGA-12-DM00170568-MFG
pins: 1 SCL/SPC (io), 2 NC, 3 CS (in), 4 SDA/SDI/SDO (io), 5 C1, 6 GND (power), 7 INT/DRDY, 8 GND (power), 9 VDD (power), 10 VDD_IO (power), 11 NC, 12 NC
text: Z; X; Y

## INA180A1IDBVR
designator U?
ROHS3Compliant e3 INA180 Matte Tin (Sn) op amp amplifier circuit 2.9mm 80muA 26V 350kHz; Manufacturer: Texas Instruments; Manufacturer Lifecycle Status: ACTIVE; Input Bias Current: 80µA; Input Offset Voltage (Vos): 100µV; Max Junction Temperature (Tj): 150°C; Max Supply Voltage: 5.5V; Min Supply Voltage: 2.7V; Nominal Supply Current: 197µA; Number of Channels: 1; Supplier 1: DigiKey; Manufacturer Part Number: INA180A1IDBVR; RoHS: Compliant; Category: Amplifiers - Op Amps, Buffer, Instrumentation; Pricing 1: 1=0.52, 10=0.363, 25=0.324, 100=0.2815, 250=0.26124, 500=0.24904, 1000=0.23899 (USD); Ambient Temperature Range High: 125°C; Bandwidth: 350kHz; Case/Package: SOT-23; Height: 1.45mm; Length: 2.9mm; Lifecycle Status: Production; Max Operating Temperature: 125°C; Min Operating Temperature: -40°C; Number of Pins: 5; Schedule B: 8542330000, 8542330000|8542330000|8542330000|8542330000|8542330000; Thickness: 1.2mm; Width: 1.6mm; ComponentLink1URL: https://sigma.octopart.com:443/177332311/technical_drawing/Texas-Instruments-INA180A1IDBVR.pdf?src-supplier=Texas+Instruments; ComponentLink1Description: https://sigma.octopart.com:443/177332311/technical_drawing/Texas-Instruments-INA180A1IDBVR.pdf?src-supplier=Texas+Instruments; ComponentLink2URL: https://octopart.com:443/opatz8j6/c1?t=USVpXwc3pIVbTVy8h6XuDkkoMGvkb5KD_FqeyE2PNCczB7YTe3Q13Z_T8ujtTn4Gpso-l7jh3l6VtA3vP-Hgq8a9n1cfIPRG-tpgt9UBcaQl0MK5o67hqvQcTaIDIYwSl7JEugdJq0jtVggrhuFBiiJJDgLUBw7G871SvT8UFaWvLuMV28-GBXdYGtfIxjjOnSlCpVbhUW_om3c_pXV3PX12KrIhnnIeCDjhaOM72OKUehH2shrJDmyrmRFLZA1ON-kpg-xfMekIeTPTZvu1kdk-ipxY04WCEpSq6AhyvyePoREOm4PqxzgZUX-SXQfHeLMqAZ0U-EEJvwubD6Cq1rmkHs9VIc9CN0w7gj8JD984MXRoqBAxtRGhZEIaf43rCiTHWg&src-supplier=Texas+Instruments; ComponentLink2Description: https://octopart.com:443/opatz8j6/c1?t=USVpXwc3pIVbTVy8h6XuDkkoMGvkb5KD_FqeyE2PNCczB7YTe3Q13Z_T8ujtTn4Gpso-l7jh3l6VtA3vP-Hgq8a9n1cfIPRG-tpgt9UBcaQl0MK5o67hqvQcTaIDIYwSl7JEugdJq0jtVggrhuFBiiJJDgLUBw7G871SvT8UFaWvLuMV28-GBXdYGtfIxjjOnSlCpVbhUW_om3c_pXV3PX12KrIhnnIeCDjhaOM72OKUehH2shrJDmyrmRFLZA1ON-kpg-xfMekIeTPTZvu1kdk-ipxY04WCEpSq6AhyvyePoREOm4PqxzgZUX-SXQfHeLMqAZ0U-EEJvwubD6Cq1rmkHs9VIc9CN0w7gj8JD984MXRoqBAxtRGhZEIaf43rCiTHWg&src-supplier=Texas+Instruments; ComponentLink3URL: https://sigma.octopart.com:443/175570406/technical_drawing/Texas-Instruments-INA180A1IDBVR.pdf?src-supplier=Texas+Instruments; ComponentLink3Description: https://sigma.octopart.com:443/175570406/technical_drawing/Texas-Instruments-INA180A1IDBVR.pdf?src-supplier=Texas+Instruments; ComponentLink4URL: https://sigma.octopart.com:443/169406034/technical_drawing/Texas-Instruments-INA180A1IDBVR.pdf?src-supplier=Texas+Instruments; ComponentLink4Description: https://sigma.octopart.com:443/169406034/technical_drawing/Texas-Instruments-INA180A1IDBVR.pdf?src-supplier=Texas+Instruments; ComponentLink5URL: https://sigma.octopart.com:443/155939316/technical_drawing/Texas-Instruments-INA180A1IDBVR.pdf?src-supplier=Texas+Instruments; ComponentLink5Description: https://sigma.octopart.com:443/155939316/technical_drawing/Texas-Instruments-INA180A1IDBVR.pdf?src-supplier=Texas+Instruments; ComponentLink6URL: https://sigma.octopart.com:443/102331370/technical_drawing/Texas-Instruments-INA180A1IDBVR.pdf?src-supplier=Texas+Instruments; ComponentLink6Description: https://sigma.octopart.com:443/102331370/technical_drawing/Texas-Instruments-INA180A1IDBVR.pdf?src-supplier=Texas+Instruments; ComponentLink7URL: https://sigma.octopart.com:443/49249325/technical_drawing/Texas-Instruments-INA180A1IDBVR.pdf?src-supplier=Texas+Instruments; ComponentLink7Description: https://sigma.octopart.com:443/49249325/technical_drawing/Texas-Instruments-INA180A1IDBVR.pdf?src-supplier=Texas+Instruments; ComponentLink8URL: https://datasheet.octopart.com:443/INA180A1IDBVR-Texas-Instruments-datasheet-147835637.pdf?src-supplier=SHENGYU+ELECTRONICS; ComponentLink8Description: https://datasheet.octopart.com:443/INA180A1IDBVR-Texas-Instruments-datasheet-147835637.pdf?src-supplier=SHENGYU+ELECTRONICS; ComponentLink9URL: https://datasheet.octopart.com:443/INA180A1IDBVR-Texas-Instruments-datasheet-159598194.pdf?src-supplier=LCSC; ComponentLink9Description: https://datasheet.octopart.com:443/INA180A1IDBVR-Texas-Instruments-datasheet-159598194.pdf?src-supplier=LCSC; ComponentLink10URL: https://datasheet.octopart.com:443/INA180A1IDBVR-Texas-Instruments-datasheet-159115053.pdf?src-supplier=LCSC; ComponentLink10Description: https://datasheet.octopart.com:443/INA180A1IDBVR-Texas-Instruments-datasheet-159115053.pdf?src-supplier=LCSC; ComponentLink11URL: http://sigma.octopart.com:80/reach_statement/Texas-Instruments-company-64.pdf?src-supplier=Compliance+Statements; ComponentLink11Description: http://sigma.octopart.com:80/reach_statement/Texas-Instruments-company-64.pdf?src-supplier=Compliance+Statements; ComponentLink12URL: http://sigma.octopart.com:80/conflict_mineral_statement/Texas-Instruments-company-63.pdf?src-supplier=Compliance+Statements; ComponentLink12Description: http://sigma.octopart.com:80/conflict_mineral_statement/Texas-Instruments-company-63.pdf?src-supplier=Compliance+Statements; Supplier Part Number 1: 296-47652-1-ND
footprint FP-DBV0005A-MFG
pins: 1 OUT, 2 GND (power), 3 IN+, 4 IN-, 5 VS (power)
text: +; -

## INA180A2IDBVR
designator U?
IC CURR SENSE 1 CIRCUIT SOT23-5 / Current Sense Amplifier 1 Circuit Rail-to-Rail SOT-23-5; Manufacturer: Texas Instruments; Manufacturer Lifecycle Status: ACTIVE; Bandwidth: 210kHz; Input Bias Current: 80µA; Input Offset Voltage (Vos): 100µV; Max Junction Temperature (Tj): 150°C; Max Supply Voltage: 5.5V; Min Supply Voltage: 2.7V; Nominal Supply Current: 197µA; Number of Channels: 1; Output Current per Channel: 8mA; Supplier 1: DigiKey; Manufacturer Part Number: INA180A2IDBVR; RoHS: Compliant; Category: Amplifiers - Op Amps, Buffer, Instrumentation; Stock 1: 14899; Pricing 1: 1=0.46, 10=0.319, 25=0.2848, 100=0.2469, 250=0.22884, 500=0.2179, 1000=0.20892 (USD); Ambient Temperature Range High: 125°C; Case/Package: SOT-23; Height: 1.45mm; Length: 2.9mm; Lifecycle Status: Production; Max Operating Temperature: 125°C; Min Operating Temperature: -40°C; Number of Pins: 5; Schedule B: 8542330000, 8542330000|8542330000|8542330000|8542330000|8542330000|8542330000|8542330000|8542330000|8542330000|8542330000|8542330000|8542330000|8542330000|8542330000|8542330000|8542330000|8542330000|8542330000|8542330000|8542330000|8542330000|8542330000|8542330000|85; Thickness: 1.2mm; Width: 1.6mm; ComponentLink1URL: https://sigma.octopart.com:443/177332311/technical_drawing/Texas-Instruments-INA180A2IDBVR.pdf?src-supplier=Texas+Instruments; ComponentLink1Description: https://sigma.octopart.com:443/177332311/technical_drawing/Texas-Instruments-INA180A2IDBVR.pdf?src-supplier=Texas+Instruments; ComponentLink2URL: https://octopart.com:443/opatz8j6/c1?t=PVOzQILzZisyk2bYfdVQjkn-tWc1oAFc6zt7x7JuY_rkVnErd4THQG4uZKZs_V1YHj5j54Y-JaAAVleGi4i6GxYF2hQ5UeMXJBL5JaSmUbL681Cran_ZrmVts1a5VLFe6xRGruAd2paODhirjZlkAwIdfEIDTznjHCRa0K-d9TNS-1vDmQneVlbmK364ii1Y97qlfb_6TsyfIV1N4kxNr_ctUNxfqHdHICZGcQOk_RtfMd79ru2DEw08z956t1Og_U1lMbmj5ytwjvvPIme7dqBDO9z5I5ZHb20hv7ho2fJww5MJoBcn7WzHB4w6o4_rrVT25uffB4tXWIWeaVcNAa5gN3b0iLtei5wPTwPIt-aKd4R3UdlajPwwobOm1PYuKvC7zg&src-supplier=Texas+Instruments; ComponentLink2Description: https://octopart.com:443/opatz8j6/c1?t=PVOzQILzZisyk2bYfdVQjkn-tWc1oAFc6zt7x7JuY_rkVnErd4THQG4uZKZs_V1YHj5j54Y-JaAAVleGi4i6GxYF2hQ5UeMXJBL5JaSmUbL681Cran_ZrmVts1a5VLFe6xRGruAd2paODhirjZlkAwIdfEIDTznjHCRa0K-d9TNS-1vDmQneVlbmK364ii1Y97qlfb_6TsyfIV1N4kxNr_ctUNxfqHdHICZGcQOk_RtfMd79ru2DEw08z956t1Og_U1lMbmj5ytwjvvPIme7dqBDO9z5I5ZHb20hv7ho2fJww5MJoBcn7WzHB4w6o4_rrVT25uffB4tXWIWeaVcNAa5gN3b0iLtei5wPTwPIt-aKd4R3UdlajPwwobOm1PYuKvC7zg&src-supplier=Texas+Instruments; ComponentLink3URL: https://sigma.octopart.com:443/175570406/technical_drawing/Texas-Instruments-INA180A2IDBVR.pdf?src-supplier=Texas+Instruments; ComponentLink3Description: https://sigma.octopart.com:443/175570406/technical_drawing/Texas-Instruments-INA180A2IDBVR.pdf?src-supplier=Texas+Instruments; ComponentLink4URL: https://sigma.octopart.com:443/169406034/technical_drawing/Texas-Instruments-INA180A2IDBVR.pdf?src-supplier=Texas+Instruments; ComponentLink4Description: https://sigma.octopart.com:443/169406034/technical_drawing/Texas-Instruments-INA180A2IDBVR.pdf?src-supplier=Texas+Instruments; ComponentLink5URL: https://sigma.octopart.com:443/155939316/technical_drawing/Texas-Instruments-INA180A2IDBVR.pdf?src-supplier=Texas+Instruments; ComponentLink5Description: https://sigma.octopart.com:443/155939316/technical_drawing/Texas-Instruments-INA180A2IDBVR.pdf?src-supplier=Texas+Instruments; ComponentLink6URL: https://sigma.octopart.com:443/102331370/technical_drawing/Texas-Instruments-INA180A2IDBVR.pdf?src-supplier=Texas+Instruments; ComponentLink6Description: https://sigma.octopart.com:443/102331370/technical_drawing/Texas-Instruments-INA180A2IDBVR.pdf?src-supplier=Texas+Instruments; ComponentLink7URL: https://sigma.octopart.com:443/49249325/technical_drawing/Texas-Instruments-INA180A2IDBVR.pdf?src-supplier=Texas+Instruments; ComponentLink7Description: https://sigma.octopart.com:443/49249325/technical_drawing/Texas-Instruments-INA180A2IDBVR.pdf?src-supplier=Texas+Instruments; ComponentLink8URL: https://datasheet.octopart.com:443/INA180A2IDBVR-Texas-Instruments-datasheet-147835637.pdf?src-supplier=SHENGYU+ELECTRONICS; ComponentLink8Description: https://datasheet.octopart.com:443/INA180A2IDBVR-Texas-Instruments-datasheet-147835637.pdf?src-supplier=SHENGYU+ELECTRONICS; ComponentLink9URL: https://datasheet.octopart.com:443/INA180A2IDBVR-Texas-Instruments-datasheet-184973496.pdf?src-supplier=Future+Electronics; ComponentLink9Description: https://datasheet.octopart.com:443/INA180A2IDBVR-Texas-Instruments-datasheet-184973496.pdf?src-supplier=Future+Electronics; ComponentLink10URL: https://datasheet.octopart.com:443/INA180A2IDBVR-Texas-Instruments-datasheet-159598194.pdf?src-supplier=LCSC; ComponentLink10Description: https://datasheet.octopart.com:443/INA180A2IDBVR-Texas-Instruments-datasheet-159598194.pdf?src-supplier=LCSC; ComponentLink11URL: https://datasheet.octopart.com:443/INA180A2IDBVR-Texas-Instruments-datasheet-159115053.pdf?src-supplier=LCSC; ComponentLink11Description: https://datasheet.octopart.com:443/INA180A2IDBVR-Texas-Instruments-datasheet-159115053.pdf?src-supplier=LCSC; ComponentLink12URL: http://sigma.octopart.com:80/reach_statement/Texas-Instruments-company-64.pdf?src-supplier=Compliance+Statements; ComponentLink12Description: http://sigma.octopart.com:80/reach_statement/Texas-Instruments-company-64.pdf?src-supplier=Compliance+Statements; ComponentLink13URL: http://sigma.octopart.com:80/conflict_mineral_statement/Texas-Instruments-company-63.pdf?src-supplier=Compliance+Statements; ComponentLink13Description: http://sigma.octopart.com:80/conflict_mineral_statement/Texas-Instruments-company-63.pdf?src-supplier=Compliance+Statements; Supplier Part Number 1: 296-47653-1-ND
footprint FP-DBV0005A-MFG
pins: 1 OUT, 2 GND (power), 3 IN+ (hiz), 4 IN- (hiz), 5 VS (power)
text: +; -

## MT6835GT-STD
designator U?
SPI TSSOP-16 Angle, Linear Position Measuring RoHS; Manufacturer: Magn Tek; Current - Supply: 22mA; Voltage - Supply: 3V~5.5V; Manufacturer Part Number: MT6835GT-STD; Category: Sensors; Package: TSSOP-16; Operating Temperature: -40℃~+125℃; Features: Angle nonlinearity compensation;Self-calibration;Zero position programming;Fault diagnosis; Interface: SPI; Supplier 1: LCSC; Supplier Part Number: C2932578
footprint MT6835GT-STD
pins: 1 U (io), 2 V (io), 3 W (io), 4 CAL_EN, 5 MISO (io), 6 MOSI (io), 7 SCK (io), 8 CSN (io), 9 VDD (power), 10 OUT (io), 11 TEST, 12 VSS, 13 TEST_EN, 14 Z (io), 15 B (io), 16 A (io)

## STM32G431C6T6
designator U?
Microcontroller 32-Bit ARM Cortex-M4 RISC 32K-Byte Flash 3.3V 48-Pin LQFP; Manufacturer: STMicroelectronics; ADC Channels (Resolution): 17-Ch 12-Bit; DAC Channels (Resolution): 4-Ch 12-Bit; EEPROM Memory Size: 0B; Flash Memory Size: 32kB; Frequency: 170MHz; Interface: USB; Max Frequency: 48MHz; Max Supply Current: 29mA; Max Supply Voltage: 3.6V; Min Supply Voltage: 1.71V; Nominal Supply Voltage (DC): 3V; Number of A/D Converters: 2; Number of Channels: 17; Number of I2C Channels: 3; Number of I/Os: 5; Number of Interrupts: 16; Number of Timers/Counters: 12; Peripherals: POR; Supplier 1: Future Electronics; Manufacturer Part Number: STM32G431C6T6; RoHS: Compliant; Category: Microcontrollers; Stock 1: 1500; Pricing 1: 1500=2.29 (USD); Case/Package: LFQFP; China RoHS: Compliant; Core Architecture: ARM Cortex-M4; Country of Origin: Mainland China, Taiwan; Export Control Classification Number (ECCN) Code: 3A991.A.2; Height - Seated (Max): 1.6mm; Harmonized Tariff Schedule (HTS) Code: 8542.31.00.25; Introduction Date: 2019-10-29; Length: 7mm; Lifecycle Status: Production; Max Operating Temperature: 85°C; Memory Type: FLASH; Min Operating Temperature: -40°C; Number of D/A Converters: 2; Number of SPI Channels: 3; Number of Terminals: 48; Number of USART Channels: 3; RAM Size: 32kB; REACH SVHC: Yes; Schedule B: 8542310000, 8542310000|8542310000|8542310000|8542310000|8542310000; Terminal Pitch: 500µm; Width: 7mm; ComponentLink1URL: https://datasheet.octopart.com:443/STM32G431C6T6-STMicroelectronics-datasheet-159144895.pdf?src-supplier=Newark; ComponentLink1Description: https://datasheet.octopart.com:443/STM32G431C6T6-STMicroelectronics-datasheet-159144895.pdf?src-supplier=Newark; ComponentLink2URL: https://datasheet.octopart.com:443/STM32G431C6T6-STMicroelectronics-datasheet-144618855.pdf?src-supplier=TME; ComponentLink2Description: https://datasheet.octopart.com:443/STM32G431C6T6-STMicroelectronics-datasheet-144618855.pdf?src-supplier=TME; Supplier Part Number 1: STM32G431C6T6
footprint LQFP48-7x7mm
part A pins: 2 PC13 (io), 3 PC14-OSC32_IN (io), 4 PC15-OSC32_OUT (io), 5 PF0-OSC_IN (io), 6 PF1-OSC_OUT (io), 8 PA0 (io), 9 PA1 (io), 10 PA2 (io), 11 PA3 (io), 12 PA4 (io), 13 PA5 (io), 14 PA6 (io), 15 PA7 (io), 16 PB0 (io), 17 PB1 (io), 18 PB2 (io), 22 PB10 (io), 25 PB11 (io), 26 PB12 (io), 27 PB13 (io), 28 PB14 (io), 29 PB15 (io), 30 PA8 (io), 31 PA9 (io), 32 PA10 (io), 33 PA11 (io), 34 PA12 (io), 37 PA13 (io), 38 PA14 (io), 39 PA15 (io), 40 PB3 (io), 41 PB4 (io), 42 PB5 (io), 43 PB6 (io), 44 PB7 (io), 46 PB9 (io)
part B pins: 1 VBAT (power), 7 PG10-NRST (io), 19 VSSA (power), 20 VREF+ (power), 21 VDDA (power), 23 VSS (power), 24 VDD (power), 35 VSS (power), 36 VDD (power), 45 PB8-BOOT0 (io), 47 VSS (power), 48 VDD (power)
part A text: 1 of 2
part B text: 2 of 2